# Altium footprint library Terminal_Blocks_Pluggable PCB_5.08mm.PcbLib: 299 footprints (part 8 of 19)
Each footprint in its own frame and in the unit in brackets; x right, y up, seen from the top. Pads: shape width x height; smd on the part's side, far side on the other; paste and mask are expansions set on the pad; w line width, h text height; cw(c..) or ccw(c..) is an arc to the next point about the centre after c.
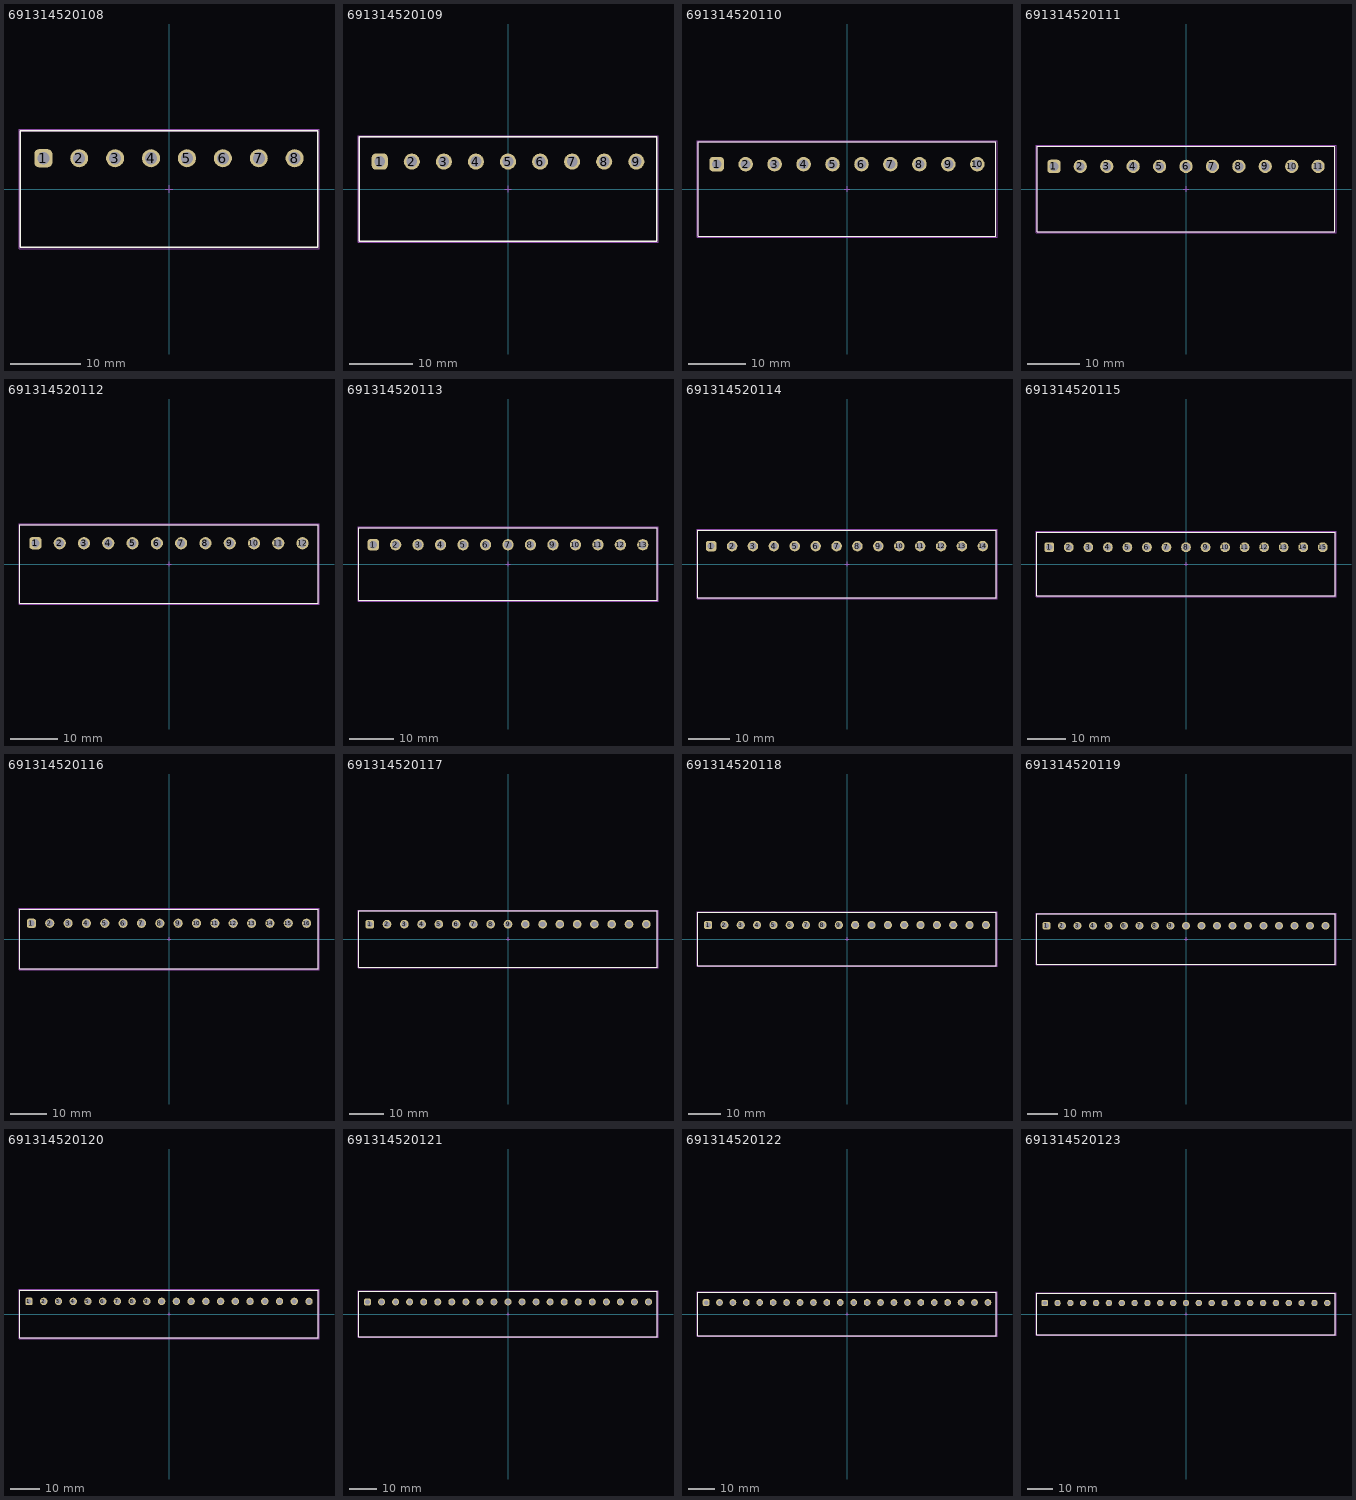
[diagram p7: the footprints below, top view; thin cyan lines are the x and y axes]

## 691314520108 [mm] "5,08mm - PCB Headers - 45¡ã- 08p"
height 14.5
pads (8):
  rrect50% 2.55x2.55 hole 1.7: 1(-17.78,4.35)
  round 2.55 hole 1.7: 2(-12.7,4.35) 3(-7.62,4.35) 4(-2.54,4.35) 5(2.54,4.35) 6(7.62,4.35) 7(12.7,4.35) 8(17.78,4.35)
Top Overlay:
  lines w0.2: -21.02,-8.25 -21.02,8.25 21.02,8.25 21.02,-8.25 -21.02,-8.25
Top Designator:
  text ".Designator" at -7.498,-0.5 h1.5
Top Component Outline:
  lines w0.1: -21.02,-8.25 21.02,-8.25 21.02,8.25 -21.02,8.25 -21.02,-8.25
Top 3D Body:
  lines w0.1: -21.02,-8.25 -21.02,8.25 21.02,8.25 21.02,-8.25 -21.02,-8.25
Top Courtyard:
  lines w0.05: -21.22,-8.45 21.22,-8.45 21.22,8.45 -21.22,8.45 -21.22,-8.45
Top Component Center:
  lines w0.05: -0.5,0 0.5,0 ; 0,-0.5 0,0.5
3D body "691314520108.stp": height 14.55, standoff -4.05, extent -21.02,-8.25 21.02,8.25

## 691314520109 [mm] "5,08mm - PCB Headers - 45¡ã- 09p"
height 14.5
pads (9):
  rrect50% 2.55x2.55 hole 1.7: 1(-20.32,4.35)
  round 2.55 hole 1.7: 2(-15.24,4.35) 3(-10.16,4.35) 4(-5.08,4.35) 5(0,4.35) 6(5.08,4.35) 7(10.16,4.35) 8(15.24,4.35) 9(20.32,4.35)
Top Overlay:
  lines w0.2: -23.56,-8.25 -23.56,8.25 23.56,8.25 23.56,-8.25 -23.56,-8.25
Top Designator:
  text ".Designator" at -7.498,-0.5 h1.5
Top Component Outline:
  lines w0.1: -23.56,-8.25 23.56,-8.25 23.56,8.25 -23.56,8.25 -23.56,-8.25
Top 3D Body:
  lines w0.1: -23.56,-8.25 -23.56,8.25 23.56,8.25 23.56,-8.25 -23.56,-8.25
Top Courtyard:
  lines w0.05: -23.76,-8.45 23.76,-8.45 23.76,8.45 -23.76,8.45 -23.76,-8.45
Top Component Center:
  lines w0.05: -0.5,0 0.5,0 ; 0,-0.5 0,0.5
3D body "691314520109.stp": height 14.55, standoff -4.05, extent -23.56,-8.25 23.56,8.25

## 691314520110 [mm] "5,08mm - PCB Headers - 45¡ã- 10p"
height 14.5
pads (10):
  rrect50% 2.55x2.55 hole 1.7: 1(-22.86,4.35)
  round 2.55 hole 1.7: 2(-17.78,4.35) 3(-12.7,4.35) 4(-7.62,4.35) 5(-2.54,4.35) 6(2.54,4.35) 7(7.62,4.35) 8(12.7,4.35) 9(17.78,4.35) 10(22.86,4.35)
Top Overlay:
  lines w0.2: -26.1,-8.25 26.1,-8.25 26.1,8.25 -26.1,8.25 -26.1,-8.25
Top Designator:
  text ".Designator" at -7.498,-0.5 h1.5
Top Component Outline:
  lines w0.1: -26.1,-8.25 -26.1,8.25 26.1,8.25 26.1,-8.25 -26.1,-8.25
Top 3D Body:
  lines w0.1: -26.1,-8.25 26.1,-8.25 26.1,8.25 -26.1,8.25 -26.1,-8.25
Top Courtyard:
  lines w0.05: -26.3,-8.45 -26.3,8.45 26.3,8.45 26.3,-8.45 -26.3,-8.45
Top Component Center:
  lines w0.05: -0.5,0 0.5,0 ; 0,-0.5 0,0.5
3D body "691314520110.stp": height 14.55, standoff -4.05, extent -26.1,-8.25 26.1,8.25

## 691314520111 [mm] "5,08mm - PCB Headers - 45¡ã- 11p"
height 14.5
pads (11):
  rrect50% 2.55x2.55 hole 1.7: 1(-25.4,4.35)
  round 2.55 hole 1.7: 2(-20.32,4.35) 3(-15.24,4.35) 4(-10.16,4.35) 5(-5.08,4.35) 6(0,4.35) 7(5.08,4.35) 8(10.16,4.35) 9(15.24,4.35) 10(20.32,4.35) 11(25.4,4.35)
Top Overlay:
  lines w0.2: -28.64,-8.25 -28.64,8.25 28.64,8.25 28.64,-8.25 -28.64,-8.25
Top Designator:
  text ".Designator" at -7.498,-0.5 h1.5
Top Component Outline:
  lines w0.1: -28.64,-8.25 28.64,-8.25 28.64,8.25 -28.64,8.25 -28.64,-8.25
Top 3D Body:
  lines w0.1: -28.64,-8.25 -28.64,8.25 28.64,8.25 28.64,-8.25 -28.64,-8.25
Top Courtyard:
  lines w0.05: -28.84,-8.45 28.84,-8.45 28.84,8.45 -28.84,8.45 -28.84,-8.45
Top Component Center:
  lines w0.05: -0.5,0 0.5,0 ; 0,-0.5 0,0.5
3D body "691314520111.stp": height 14.55, standoff -4.05, extent -28.64,-8.25 28.64,8.25

## 691314520112 [mm] "5,08mm - PCB Headers - 45¡ã- 12p"
height 14.5
pads (12):
  rrect50% 2.55x2.55 hole 1.7: 1(-27.94,4.35)
  round 2.55 hole 1.7: 2(-22.86,4.35) 3(-17.78,4.35) 4(-12.7,4.35) 5(-7.62,4.35) 6(-2.54,4.35) 7(2.54,4.35) 8(7.62,4.35) 9(12.7,4.35) 10(17.78,4.35) 11(22.86,4.35) 12(27.94,4.35)
Top Overlay:
  lines w0.2: -31.18,-8.25 31.18,-8.25 31.18,8.25 -31.18,8.25 -31.18,-8.25
Top Designator:
  text ".Designator" at -7.498,-0.5 h1.5
Top Component Outline:
  lines w0.1: -31.18,-8.25 -31.18,8.25 31.18,8.25 31.18,-8.25 -31.18,-8.25
Top 3D Body:
  lines w0.1: -31.18,-8.25 31.18,-8.25 31.18,8.25 -31.18,8.25 -31.18,-8.25
Top Courtyard:
  lines w0.05: -31.38,-8.45 -31.38,8.45 31.38,8.45 31.38,-8.45 -31.38,-8.45
Top Component Center:
  lines w0.05: -0.5,0 0.5,0 ; 0,-0.5 0,0.5
3D body "691314520112.stp": height 14.55, standoff -4.05, extent -31.18,-8.25 31.18,8.25

## 691314520113 [mm] "5,08mm - PCB Headers - 45¡ã- 13p"
height 14.5
pads (13):
  rrect50% 2.55x2.55 hole 1.7: 1(-30.48,4.35)
  round 2.55 hole 1.7: 2(-25.4,4.35) 3(-20.32,4.35) 4(-15.24,4.35) 5(-10.16,4.35) 6(-5.08,4.35) 7(0,4.35) 8(5.08,4.35) 9(10.16,4.35) 10(15.24,4.35) 11(20.32,4.35) 12(25.4,4.35) 13(30.48,4.35)
Top Overlay:
  lines w0.2: -33.72,-8.25 -33.72,8.25 33.72,8.25 33.72,-8.25 -33.72,-8.25
Top Designator:
  text ".Designator" at -7.498,-0.5 h1.5
Top Component Outline:
  lines w0.1: -33.72,-8.25 33.72,-8.25 33.72,8.25 -33.72,8.25 -33.72,-8.25
Top 3D Body:
  lines w0.1: -33.72,-8.25 -33.72,8.25 33.72,8.25 33.72,-8.25 -33.72,-8.25
Top Courtyard:
  lines w0.05: -33.92,-8.45 33.92,-8.45 33.92,8.45 -33.92,8.45 -33.92,-8.45
Top Component Center:
  lines w0.05: -0.5,0 0.5,0 ; 0,-0.5 0,0.5
3D body "691314520113.stp": height 14.55, standoff -4.05, extent -33.72,-8.25 33.72,8.25

## 691314520114 [mm] "5,08mm - PCB Headers - 45¡ã- 14p"
height 14.5
pads (14):
  rrect50% 2.55x2.55 hole 1.7: 1(-33.02,4.35)
  round 2.55 hole 1.7: 2(-27.94,4.35) 3(-22.86,4.35) 4(-17.78,4.35) 5(-12.7,4.35) 6(-7.62,4.35) 7(-2.54,4.35) 8(2.54,4.35) 9(7.62,4.35) 10(12.7,4.35) 11(17.78,4.35) 12(22.86,4.35) 13(27.94,4.35) 14(33.02,4.35)
Top Overlay:
  lines w0.2: -36.26,-8.25 36.26,-8.25 36.26,8.25 -36.26,8.25 -36.26,-8.25
Top Designator:
  text ".Designator" at -7.498,-0.5 h1.5
Top Component Outline:
  lines w0.1: -36.26,-8.25 -36.26,8.25 36.26,8.25 36.26,-8.25 -36.26,-8.25
Top 3D Body:
  lines w0.1: -36.26,-8.25 36.26,-8.25 36.26,8.25 -36.26,8.25 -36.26,-8.25
Top Courtyard:
  lines w0.05: -36.46,-8.45 -36.46,8.45 36.46,8.45 36.46,-8.45 -36.46,-8.45
Top Component Center:
  lines w0.05: -0.5,0 0.5,0 ; 0,-0.5 0,0.5
3D body "691314520114.stp": height 14.55, standoff -4.05, extent -36.26,-8.25 36.26,8.25

## 691314520115 [mm] "5,08mm - PCB Headers - 45¡ã- 15p"
height 14.5
pads (15):
  rrect50% 2.55x2.55 hole 1.7: 1(-35.56,4.35)
  round 2.55 hole 1.7: 2(-30.48,4.35) 3(-25.4,4.35) 4(-20.32,4.35) 5(-15.24,4.35) 6(-10.16,4.35) 7(-5.08,4.35) 8(0,4.35) 9(5.08,4.35) 10(10.16,4.35) 11(15.24,4.35) 12(20.32,4.35) 13(25.4,4.35) 14(30.48,4.35) 15(35.56,4.35)
Top Overlay:
  lines w0.2: -38.8,-8.25 -38.8,8.25 38.8,8.25 38.8,-8.25 -38.8,-8.25
Top Designator:
  text ".Designator" at -7.498,-0.5 h1.5
Top Component Outline:
  lines w0.1: -38.8,-8.25 38.8,-8.25 38.8,8.25 -38.8,8.25 -38.8,-8.25
Top 3D Body:
  lines w0.1: -38.8,-8.25 -38.8,8.25 38.8,8.25 38.8,-8.25 -38.8,-8.25
Top Courtyard:
  lines w0.05: -39,-8.45 39,-8.45 39,8.45 -39,8.45 -39,-8.45
Top Component Center:
  lines w0.05: -0.5,0 0.5,0 ; 0,-0.5 0,0.5
3D body "691314520115.stp": height 14.55, standoff -4.05, extent -38.8,-8.25 38.8,8.25

## 691314520116 [mm] "5,08mm - PCB Headers - 45¡ã- 16p"
height 14.5
pads (16):
  rrect50% 2.55x2.55 hole 1.7: 1(-38.1,4.35)
  round 2.55 hole 1.7: 2(-33.02,4.35) 3(-27.94,4.35) 4(-22.86,4.35) 5(-17.78,4.35) 6(-12.7,4.35) 7(-7.62,4.35) 8(-2.54,4.35) 9(2.54,4.35) 10(7.62,4.35) 11(12.7,4.35) 12(17.78,4.35) 13(22.86,4.35) 14(27.94,4.35) 15(33.02,4.35) 16(38.1,4.35)
Top Overlay:
  lines w0.2: -41.34,-8.25 -41.34,8.25 41.34,8.25 41.34,-8.25 -41.34,-8.25
Top Designator:
  text ".Designator" at -7.498,-0.5 h1.5
Top Component Outline:
  lines w0.1: -41.34,-8.25 41.34,-8.25 41.34,8.25 -41.34,8.25 -41.34,-8.25
Top 3D Body:
  lines w0.1: -41.34,-8.25 -41.34,8.25 41.34,8.25 41.34,-8.25 -41.34,-8.25
Top Courtyard:
  lines w0.05: -41.54,-8.45 41.54,-8.45 41.54,8.45 -41.54,8.45 -41.54,-8.45
Top Component Center:
  lines w0.05: -0.5,0 0.5,0 ; 0,-0.5 0,0.5
3D body "691314520116.stp": height 14.55, standoff -4.05, extent -41.34,-8.25 41.34,8.25

## 691314520117 [mm] "5,08mm - PCB Headers - 45¡ã- 17p"
height 14.5
pads (17):
  rrect50% 2.55x2.55 hole 1.7: 1(-40.64,4.35)
  round 2.55 hole 1.7: 2(-35.56,4.35) 3(-30.48,4.35) 4(-25.4,4.35) 5(-20.32,4.35) 6(-15.24,4.35) 7(-10.16,4.35) 8(-5.08,4.35) 9(0,4.35) 10(5.08,4.35) 11(10.16,4.35) 12(15.24,4.35) 13(20.32,4.35) 14(25.4,4.35) 15(30.48,4.35) 16(35.56,4.35) 17(40.64,4.35)
Top Overlay:
  lines w0.2: -43.88,-8.25 43.88,-8.25 43.88,8.25 -43.88,8.25 -43.88,-8.25
Top Designator:
  text ".Designator" at -7.498,-0.5 h1.5
Top Component Outline:
  lines w0.1: -43.88,-8.25 -43.88,8.25 43.88,8.25 43.88,-8.25 -43.88,-8.25
Top 3D Body:
  lines w0.1: -43.88,-8.25 43.88,-8.25 43.88,8.25 -43.88,8.25 -43.88,-8.25
Top Courtyard:
  lines w0.05: -44.08,-8.45 -44.08,8.45 44.08,8.45 44.08,-8.45 -44.08,-8.45
Top Component Center:
  lines w0.05: -0.5,0 0.5,0 ; 0,-0.5 0,0.5
3D body "691314520117.stp": height 14.55, standoff -4.05, extent -43.88,-8.25 43.88,8.25

## 691314520118 [mm] "5,08mm - PCB Headers - 45¡ã- 18p"
height 14.5
pads (18):
  rrect50% 2.55x2.55 hole 1.7: 1(-43.18,4.35)
  round 2.55 hole 1.7: 2(-38.1,4.35) 3(-33.02,4.35) 4(-27.94,4.35) 5(-22.86,4.35) 6(-17.78,4.35) 7(-12.7,4.35) 8(-7.62,4.35) 9(-2.54,4.35) 10(2.54,4.35) 11(7.62,4.35) 12(12.7,4.35) 13(17.78,4.35) 14(22.86,4.35) 15(27.94,4.35) 16(33.02,4.35) 17(38.1,4.35) 18(43.18,4.35)
Top Overlay:
  lines w0.2: -46.42,-8.25 46.42,-8.25 46.42,8.25 -46.42,8.25 -46.42,-8.25
Top Designator:
  text ".Designator" at -7.498,-0.5 h1.5
Top Component Outline:
  lines w0.1: -46.42,-8.25 -46.42,8.25 46.42,8.25 46.42,-8.25 -46.42,-8.25
Top 3D Body:
  lines w0.1: -46.42,-8.25 46.42,-8.25 46.42,8.25 -46.42,8.25 -46.42,-8.25
Top Courtyard:
  lines w0.05: -46.62,-8.45 -46.62,8.45 46.62,8.45 46.62,-8.45 -46.62,-8.45
Top Component Center:
  lines w0.05: -0.5,0 0.5,0 ; 0,-0.5 0,0.5
3D body "691314520118.stp": height 14.55, standoff -4.05, extent -46.42,-8.25 46.42,8.25

## 691314520119 [mm] "5,08mm - PCB Headers - 45¡ã- 19p"
height 14.5
pads (19):
  rrect50% 2.55x2.55 hole 1.7: 1(-45.72,4.35)
  round 2.55 hole 1.7: 2(-40.64,4.35) 3(-35.56,4.35) 4(-30.48,4.35) 5(-25.4,4.35) 6(-20.32,4.35) 7(-15.24,4.35) 8(-10.16,4.35) 9(-5.08,4.35) 10(0,4.35) 11(5.08,4.35) 12(10.16,4.35) 13(15.24,4.35) 14(20.32,4.35) 15(25.4,4.35) 16(30.48,4.35) 17(35.56,4.35) 18(40.64,4.35) 19(45.72,4.35)
Top Overlay:
  lines w0.2: -48.96,-8.25 48.96,-8.25 48.96,8.25 -48.96,8.25 -48.96,-8.25
Top Designator:
  text ".Designator" at -7.498,-0.5 h1.5
Top Component Outline:
  lines w0.1: -48.96,-8.25 -48.96,8.25 48.96,8.25 48.96,-8.25 -48.96,-8.25
Top 3D Body:
  lines w0.1: -48.96,-8.25 48.96,-8.25 48.96,8.25 -48.96,8.25 -48.96,-8.25
Top Courtyard:
  lines w0.05: -49.16,-8.45 -49.16,8.45 49.16,8.45 49.16,-8.45 -49.16,-8.45
Top Component Center:
  lines w0.05: -0.5,0 0.5,0 ; 0,-0.5 0,0.5
3D body "691314520119.stp": height 14.55, standoff -4.05, extent -48.96,-8.25 48.96,8.25

## 691314520120 [mm] "5,08mm - PCB Headers - 45¡ã- 20p"
height 14.5
pads (20):
  rrect50% 2.55x2.55 hole 1.7: 1(-48.26,4.35)
  round 2.55 hole 1.7: 2(-43.18,4.35) 3(-38.1,4.35) 4(-33.02,4.35) 5(-27.94,4.35) 6(-22.86,4.35) 7(-17.78,4.35) 8(-12.7,4.35) 9(-7.62,4.35) 10(-2.54,4.35) 11(2.54,4.35) 12(7.62,4.35) 13(12.7,4.35) 14(17.78,4.35) 15(22.86,4.35) 16(27.94,4.35) 17(33.02,4.35) 18(38.1,4.35) 19(43.18,4.35) 20(48.26,4.35)
Top Overlay:
  lines w0.2: -51.5,-8.25 51.5,-8.25 51.5,8.25 -51.5,8.25 -51.5,-8.25
Top Designator:
  text ".Designator" at -7.498,-0.5 h1.5
Top Component Outline:
  lines w0.1: -51.5,-8.25 -51.5,8.25 51.5,8.25 51.5,-8.25 -51.5,-8.25
Top 3D Body:
  lines w0.1: -51.5,-8.25 51.5,-8.25 51.5,8.25 -51.5,8.25 -51.5,-8.25
Top Courtyard:
  lines w0.05: -51.7,-8.45 -51.7,8.45 51.7,8.45 51.7,-8.45 -51.7,-8.45
Top Component Center:
  lines w0.05: -0.5,0 0.5,0 ; 0,-0.5 0,0.5
3D body "691314520120.stp": height 14.55, standoff -4.05, extent -51.5,-8.25 51.5,8.25

## 691314520121 [mm] "5,08mm - PCB Headers - 45¡ã- 21p"
height 14.5
pads (21):
  rrect50% 2.55x2.55 hole 1.7: 1(-50.8,4.35)
  round 2.55 hole 1.7: 2(-45.72,4.35) 3(-40.64,4.35) 4(-35.56,4.35) 5(-30.48,4.35) 6(-25.4,4.35) 7(-20.32,4.35) 8(-15.24,4.35) 9(-10.16,4.35) 10(-5.08,4.35) 11(0,4.35) 12(5.08,4.35) 13(10.16,4.35) 14(15.24,4.35) 15(20.32,4.35) 16(25.4,4.35) 17(30.48,4.35) 18(35.56,4.35) 19(40.64,4.35) 20(45.72,4.35) 21(50.8,4.35)
Top Overlay:
  lines w0.2: -54.04,-8.25 -54.04,8.25 54.04,8.25 54.04,-8.25 -54.04,-8.25
Top Designator:
  text ".Designator" at -7.498,-0.5 h1.5
Top Component Outline:
  lines w0.1: -54.04,-8.25 54.04,-8.25 54.04,8.25 -54.04,8.25 -54.04,-8.25
Top 3D Body:
  lines w0.1: -54.04,-8.25 -54.04,8.25 54.04,8.25 54.04,-8.25 -54.04,-8.25
Top Courtyard:
  lines w0.05: -54.24,-8.45 54.24,-8.45 54.24,8.45 -54.24,8.45 -54.24,-8.45
Top Component Center:
  lines w0.05: -0.5,0 0.5,0 ; 0,-0.5 0,0.5
3D body "691314520121.stp": height 14.55, standoff -4.05, extent -54.04,-8.25 54.04,8.25

## 691314520122 [mm] "5,08mm - PCB Headers - 45¡ã- 22p"
height 14.5
pads (22):
  rrect50% 2.55x2.55 hole 1.7: 1(-53.34,4.35)
  round 2.55 hole 1.7: 2(-48.26,4.35) 3(-43.18,4.35) 4(-38.1,4.35) 5(-33.02,4.35) 6(-27.94,4.35) 7(-22.86,4.35) 8(-17.78,4.35) 9(-12.7,4.35) 10(-7.62,4.35) 11(-2.54,4.35) 12(2.54,4.35) 13(7.62,4.35) 14(12.7,4.35) 15(17.78,4.35) 16(22.86,4.35) 17(27.94,4.35) 18(33.02,4.35) 19(38.1,4.35) 20(43.18,4.35) 21(48.26,4.35) 22(53.34,4.35)
Top Overlay:
  lines w0.2: -56.58,-8.25 56.58,-8.25 56.58,8.25 -56.58,8.25 -56.58,-8.25
Top Designator:
  text ".Designator" at -7.498,-0.5 h1.5
Top Component Outline:
  lines w0.1: -56.58,-8.25 -56.58,8.25 56.58,8.25 56.58,-8.25 -56.58,-8.25
Top 3D Body:
  lines w0.1: -56.58,-8.25 56.58,-8.25 56.58,8.25 -56.58,8.25 -56.58,-8.25
Top Courtyard:
  lines w0.05: -56.78,-8.45 -56.78,8.45 56.78,8.45 56.78,-8.45 -56.78,-8.45
Top Component Center:
  lines w0.05: -0.5,0 0.5,0 ; 0,-0.5 0,0.5
3D body "691314520122.stp": height 14.55, standoff -4.05, extent -56.58,-8.25 56.58,8.25

## 691314520123 [mm] "5,08mm - PCB Headers - 45¡ã- 23p"
height 14.5
pads (23):
  rrect50% 2.55x2.55 hole 1.7: 1(-55.88,4.35)
  round 2.55 hole 1.7: 2(-50.8,4.35) 3(-45.72,4.35) 4(-40.64,4.35) 5(-35.56,4.35) 6(-30.48,4.35) 7(-25.4,4.35) 8(-20.32,4.35) 9(-15.24,4.35) 10(-10.16,4.35) 11(-5.08,4.35) 12(0,4.35) 13(5.08,4.35) 14(10.16,4.35) 15(15.24,4.35) 16(20.32,4.35) 17(25.4,4.35) 18(30.48,4.35) 19(35.56,4.35) 20(40.64,4.35) 21(45.72,4.35) 22(50.8,4.35) 23(55.88,4.35)
Top Overlay:
  lines w0.2: -59.12,-8.25 59.12,-8.25 59.12,8.25 -59.12,8.25 -59.12,-8.25
Top Designator:
  text ".Designator" at -7.498,-0.5 h1.5
Top Component Outline:
  lines w0.1: -59.12,-8.25 -59.12,8.25 59.12,8.25 59.12,-8.25 -59.12,-8.25
Top 3D Body:
  lines w0.1: -59.12,-8.25 59.12,-8.25 59.12,8.25 -59.12,8.25 -59.12,-8.25
Top Courtyard:
  lines w0.05: -59.32,-8.45 -59.32,8.45 59.32,8.45 59.32,-8.45 -59.32,-8.45
Top Component Center:
  lines w0.05: -0.5,0 0.5,0 ; 0,-0.5 0,0.5
3D body "691314520123.stp": height 14.55, standoff -4.05, extent -59.12,-8.25 59.12,8.25